# Altium footprint library XT30PBM.PcbLib: 1 footprints
Each footprint in its own frame and in the unit in brackets; x right, y up, seen from the top. Pads: shape width x height; smd on the part's side, far side on the other; paste and mask are expansions set on the pad; w line width, h text height; cw(c..) or ccw(c..) is an arc to the next point about the centre after c.
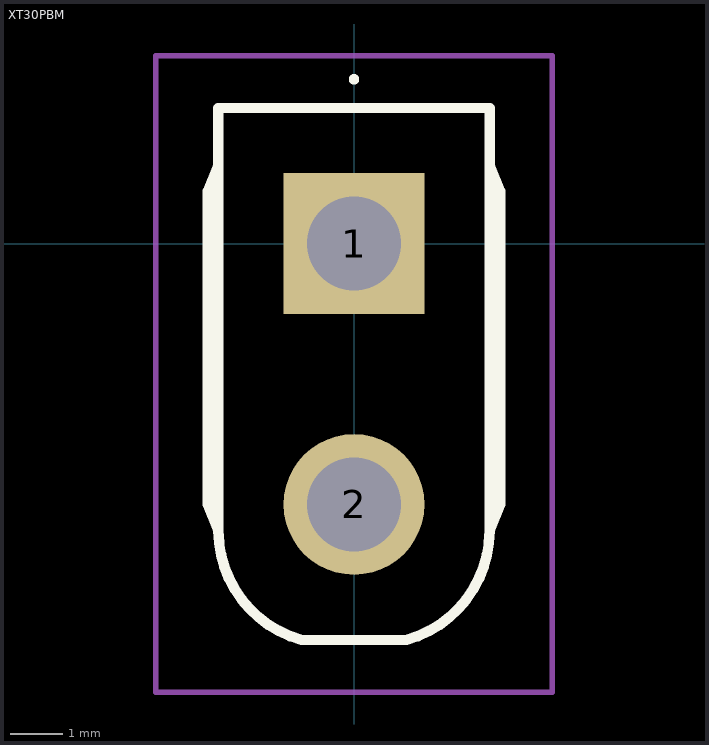
[diagram p0: the footprint, top view; thin cyan lines are the x and y axes]

## XT30PBM [mm]
pads (2):
  rect 2.7x2.7 hole 1.8: 1(0,0)
  round 2.7 hole 1.8: 2(0,-5)
Top Overlay:
  lines w0.1: 0,3.1 0,3.1 ; 0,3.1 ccw(c0,3.15) 0,3.2 ; 0,3.1 cw(c0,3.15) 0,3.2 ; 0,3.2 0,3.2
  lines w0.2: -2.6,1.5 -2.8,1 -2.8,-5 -2.6,-5.5 ; -1,-7.6 cw(c-0.422,-5.5) -2.6,-5.5 ; -1,-7.6 0,-7.6 1,-7.6 ; 1,-7.6 ccw(c0.422,-5.5) 2.6,-5.5 ; 2.6,1.5 2.8,1 2.8,-5 2.6,-5.5 ; -2.6,-5.5 -2.6,2.6 0,2.6 2.6,2.6 2.6,-5.5 ; -2.6,-5.5 -2.6,-5.5 ; 2.6,-5.5 2.6,-5.5
Mechanical 15:
  lines w0.1: -2.6,1.5 -2.8,1 -2.8,-5 -2.6,-5.5 ; -1,-7.6 cw(c-0.422,-5.5) -2.6,-5.5 ; -1,-7.6 0,-7.6 1,-7.6 ; 1,-7.6 ccw(c0.422,-5.5) 2.6,-5.5 ; 2.6,1.5 2.8,1 2.8,-5 2.6,-5.5 ; -2.6,-5.5 -2.6,2.6 0,2.6 2.6,2.6 2.6,-5.5 ; -2.6,-5.5 -2.6,-5.5 ; 2.6,-5.5 2.6,-5.5
Mechanical 20:
  lines w0.1: -3.8,-8.6 3.8,-8.6 3.8,3.6 -3.8,3.6 -3.8,-8.6